# Altium footprint library aksima_footprint.PcbLib: 56 footprints (part 4 of 4)
Each footprint in its own frame and in the unit in brackets; x right, y up, seen from the top. Pads: shape width x height; smd on the part's side, far side on the other; paste and mask are expansions set on the pad; w line width, h text height; cw(c..) or ccw(c..) is an arc to the next point about the centre after c.
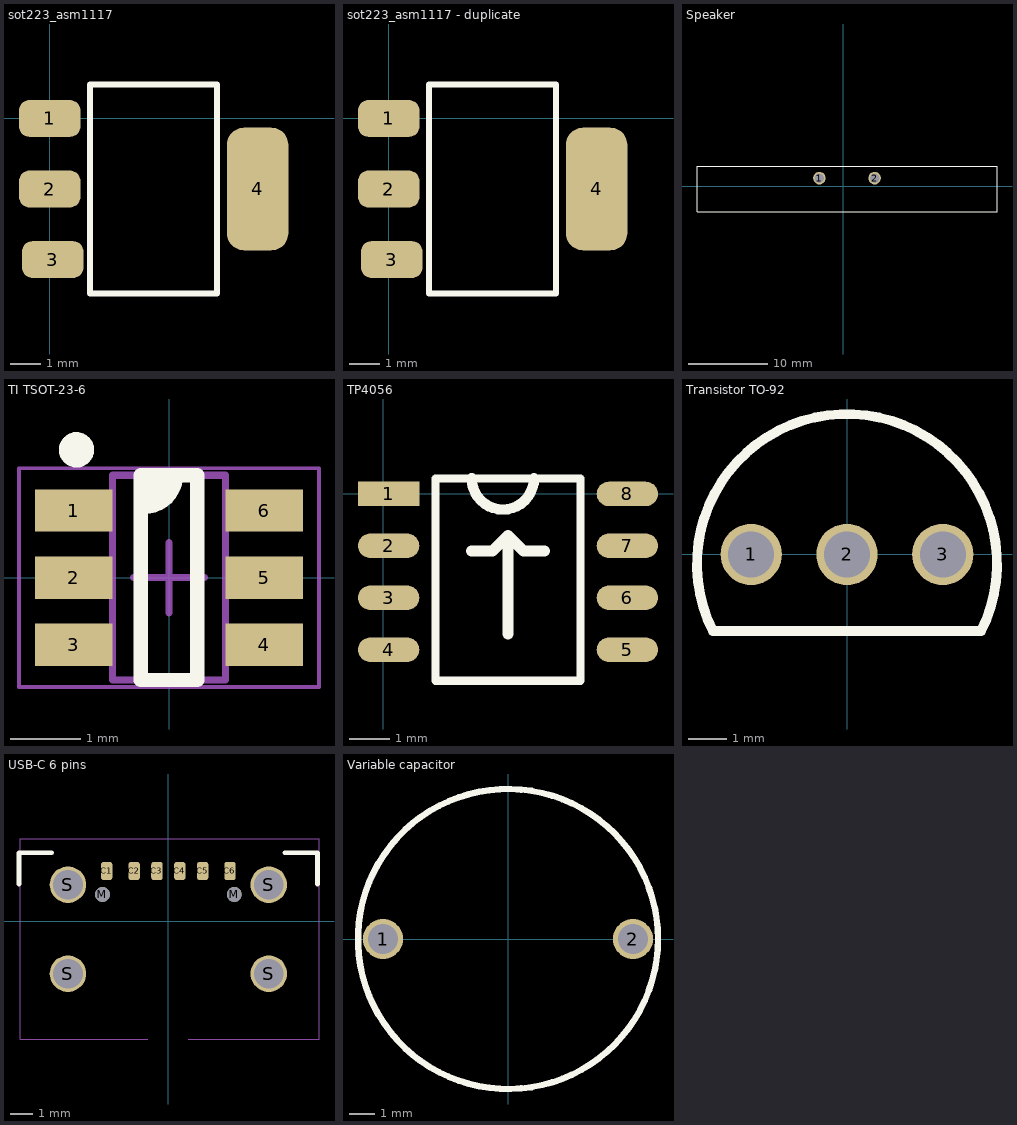
[diagram p3: the footprints below, top view; thin cyan lines are the x and y axes]

## sot223_asm1117 [mm] "Linear voltage regulator, SOT-223"
pads (4):
  rrect55% 2x1.2 smd: 1(0,0) 2(0,-2.3) 3(0.1,-4.6)
  rrect55% 2x4 smd: 4(6.775,-2.3)
Top Overlay:
  lines w0.2: 1.317,-5.7 1.317,1.1 5.45,1.1 5.45,-5.7 1.317,-5.7
  text "." at -0.6,1.054 h4.5
3D body "AMS1117 Sot 223.step": height 1.8, standoff -0.22, extent -0.45,-5.579 6.923,0.921

## sot223_asm1117 - duplicate [mm] "SOT-223 regulator footprint, alternate library entry"
pads (4):
  rrect55% 2x1.2 smd: 1(0,0) 2(0,-2.3) 3(0.1,-4.6)
  rrect55% 2x4 smd: 4(6.775,-2.3)
Top Overlay:
  lines w0.2: 1.317,-5.7 1.317,1.1 5.45,1.1 5.45,-5.7 1.317,-5.7
  text "." at -0.6,1.054 h4.5
3D body "AMS1117 Sot 223.step": height 1.8, standoff -0.22, extent -0.45,-5.579 6.923,0.921

## Speaker [mm] "Speaker footprint"
pads (2):
  round 1.6 hole 1.2: 1(-3,1) 2(4,1)
Top Overlay:
  lines w0.15: -18.5,-3.25 -18.5,2.5 19.5,2.5 19.5,-3.25 -18.5,-3.25
3D body "CLS0281MAE-L152.step": height 33.76, standoff -2.56, extent -18.388,-2.95 19.388,2.25

## TI TSOT-23-6 [mm] "TSOT23, 6-Leads, Body 2.90x2.80mm, Pitch 0.95mm, IPC High Density"
height 1.1
pads (6):
  rrect1% 1.1x0.6 smd: 1(-1.35,0.95) 2(-1.35,0) 3(-1.35,-0.95) 4(1.35,-0.95) 5(1.35,0) 6(1.35,0.95)
Top Overlay:
  circle w0.25: c-1.31,1.81 r0.125
  region: -0.4,1.45 0.1,1.45 0.1,1.3 -0.2,1 -0.4,1
  lines w0.2: -0.4,1 -0.35,1 ccw(c-0.35,1.45) 0.1,1.45 ; -0.4,-1.45 -0.4,1.45 0.4,1.45 0.4,-1.45 -0.4,-1.45
Mechanical 13:
  lines w0.1: -0.8,-1.45 -0.8,1.45 0.8,1.45 0.8,-1.45 -0.8,-1.45
Mechanical 15:
  lines w0.05: -2.125,-1.55 2.125,-1.55 2.125,1.55 -2.125,1.55 -2.125,-1.55
  lines w0.1: -0.5,0 0.5,0 ; 0,-0.5 0,0.5
3D body "TI - TSOT-23-6 v2.step": height 1.1, standoff 0, extent -1.4,-1.45 1.4,1.45

## TP4056 [mm] "Single-cell charger IC, TP4056"
pads (8):
  rect 1.5x0.6 smd: 1(0.127,0)
  oval 1.5x0.6 smd: 2(0.127,-1.27) 3(0.127,-2.54) 4(0.127,-3.81) 5(5.969,-3.81) 6(5.969,-2.54) 7(5.969,-1.27) 8(5.969,0)
Top Overlay:
  lines w0.2: 1.273,-4.572 1.273,0.381 4.826,0.381 4.826,-4.572 1.273,-4.572
  lines w0.254: 2.159,0.381 ccw(c2.921,0.381) 2.921,-0.381 ccw(c2.921,0.381) 3.683,0.381
  lines w0.278: 2.159,-1.397 2.667,-1.397 3.048,-1.016 ; 3.048,-3.429 3.048,-1.016 ; 3.937,-1.397 3.429,-1.397 3.048,-1.016
Mechanical 15:
  lines w0.1: 3.027,-2.069 3.027,-1.069
3D body "ESOP-8.step": height 1.82, standoff 0, extent -0.052,-4.405 6.148,0.595

## Transistor TO-92 [mm] "Transistor TO-92 footprint"
pads (3):
  round 1.6 hole 1.2: 1(-2.5,0) 2(0,0) 3(2.5,0)
Top Overlay:
  lines w0.254: -3.5,-2 cw(c0,-0.25) 3.5,-2 -3.5,-2
3D body "TO-92_line_pin_2_5mm_pitch.stp": height 8.2, standoff -3, extent -2.75,-1.85 2.75,2.501

## USB-C 6 pins [mm] "USB-C 6 pins footprint"
pads (12):
  rrect50% 0.5x0.8 smd: C1(-2.7,2.2) C2(-1.5,2.2) C3(-0.5,2.2) C4(0.5,2.2) C5(1.5,2.2) C6(2.7,2.2)
  round 0.65 hole 0.65 unplated: M(-2.89,1.175) M(2.89,1.175)
  round 1.6 hole 1.3: S(-4.4,-2.3) S(-4.4,1.6) S(4.4,-2.3) S(4.4,1.6)
Top Overlay:
  circle w0.1: c-4.4,-2.3 r0.7
  lines w0.2: -6.544,1.625 -6.544,3.002 -5.11,3.002 ; 5.1,3.002 6.534,3.002 6.534,1.625
Mechanical 15:
  lines w0.05: -0.899,-5.161 -6.5,-5.161 -6.5,3.602 6.6,3.602 6.6,-5.161 0.879,-5.161
3D body "USB_type_C_smd_6p.stp": height 3.2, standoff -1.27, extent -4.6,-5.25 4.6,2.7

## Variable capacitor [mm] "Variable capacitor footprint"
pads (2):
  round 1.6 hole 1.2: 1(-5,0) 2(5,0)
Top Overlay:
  circle w0.254: c0,0 r6
3D body "Trimmer variable capacitor.step": height 9, standoff -2.5, extent -5.28,-5.28 5.28,5